# Altium footprint library USBLC6-2SC6_C7519.PcbLib: 1 footprints
Each footprint in its own frame and in the unit in brackets; x right, y up, seen from the top. Pads: shape width x height; smd on the part's side, far side on the other; paste and mask are expansions set on the pad; w line width, h text height; cw(c..) or ccw(c..) is an arc to the next point about the centre after c.
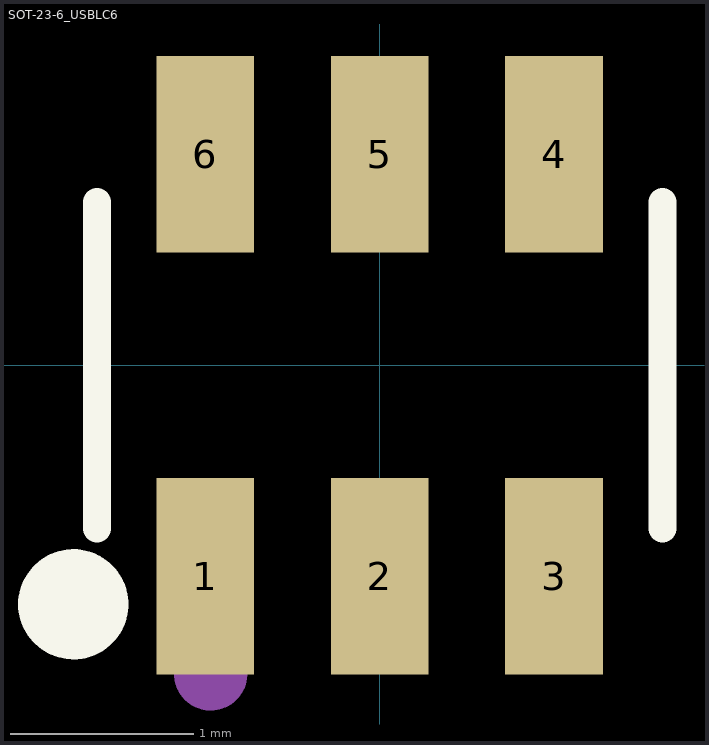
[diagram p0: the footprint, top view; thin cyan lines are the x and y axes]

## SOT-23-6_USBLC6 [mm] "单向ESD 5.25V截止 峰值脉冲电流：5A 极性:单向 反向截止电压(Vrwm):5.25V 钳位电压:17V 峰值脉冲电流(Ipp):5A 击穿电压(VBR):6V 型号:USBLC6-2SC6_C7519 LCSC C7519 厂牌:ST(意法半导体)"
height 1
pads (6):
  rect 0.532x1.072 smd mask+0.05: 1(-0.95,-1.149) 2(0,-1.149) 3(0.95,-1.149) 4(0.95,1.149) 5(0,1.149) 6(-0.95,1.149)
Top Overlay:
  circle w0.3: c-1.668,-1.301 r0.15
  region: -1.403,-1.4 -1.404,-1.388 -1.408,-1.377 -1.413,-1.367 -1.421,-1.358 -1.43,-1.35 -1.44,-1.345 -1.451,-1.341 -1.463,-1.34 -1.475,-1.341 -1.486,-1.345 -1.496,-1.35 -1.505,-1.358 -1.513,-1.367 -1.518,-1.377 -1.522,-1.388 -1.523,-1.4 -1.522,-1.412 -1.518,-1.423 -1.513,-1.433 -1.505,-1.442 -1.496,-1.45 -1.486,-1.455 -1.475,-1.459 -1.463,-1.46 -1.451,-1.459 -1.44,-1.455 -1.43,-1.45 -1.421,-1.442 -1.413,-1.433 -1.408,-1.423 -1.404,-1.412
  lines w0.152: -1.539,-0.889 -1.539,0.889 ; 1.539,-0.889 1.539,0.889
Mechanical 2:
  circle w0.2: c-0.92,-1.68 r0.1
3D body "SOT-23-6_L2.9-W1.6-P0.95-LS2.8-BL.step": height 1, standoff 0, extent -1.918,-1.88 1.639,1.785